# Altium footprint library custom-case.PcbLib: 342 footprints (part 5 of 22)
Each footprint in its own frame and in the unit in brackets; x right, y up, seen from the top. Pads: shape width x height; smd on the part's side, far side on the other; paste and mask are expansions set on the pad; w line width, h text height; cw(c..) or ccw(c..) is an arc to the next point about the centre after c.
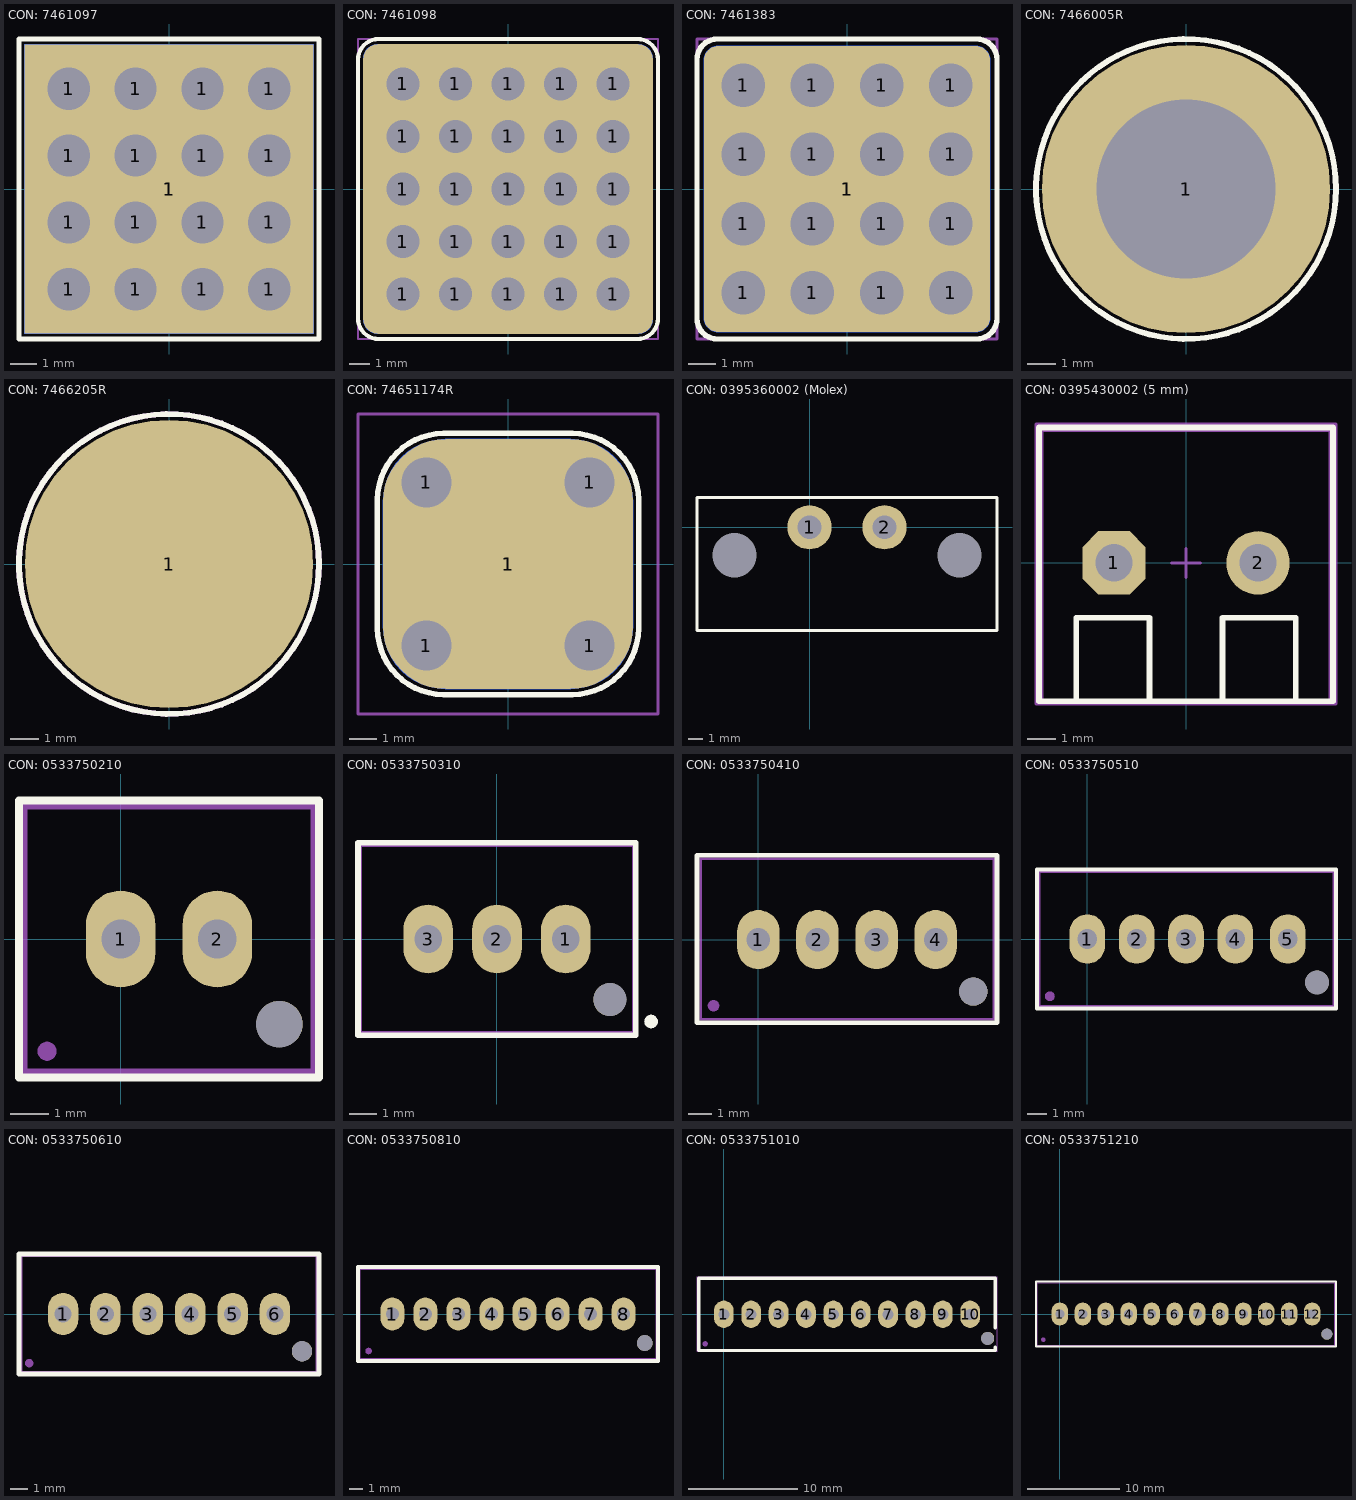
[diagram p4: the footprints below, top view; thin cyan lines are the x and y axes]

## CON: 7461097 [mm]
pads (18):
  round 2.5 hole 1.6: 1(-3.81,-3.81) 1(-3.81,-1.27) 1(-3.81,1.27) 1(-3.81,3.81) 1(-1.27,-3.81) 1(-1.27,-1.27) 1(-1.27,1.27) 1(-1.27,3.81) 1(1.27,-3.81) 1(1.27,-1.27) 1(1.27,1.27) 1(1.27,3.81) 1(3.81,-3.81) 1(3.81,-1.27) 1(3.81,1.27) 1(3.81,3.81)
  rect 11x11 smd: 1(0,0)
  rect 11x11 smd far side: 1(0,0)
Top Overlay:
  lines w0.2: -5.7,-5.7 -5.7,5.7 5.7,5.7 5.7,-5.7 -5.7,-5.7
Top Assy:
  lines w0.1: -5.7,-5.7 -5.7,5.7 5.7,5.7 5.7,-5.7 -5.7,-5.7
Size Area:
  lines w0.1: -1,0 1,0 ; 0,-1 0,1 ; -5.7,-5.7 -5.7,5.7 5.7,5.7 5.7,-5.7 -5.7,-5.7
3D body "5555.STEP": height 10.55, standoff -3.45, extent -5,-5 5,5

## CON: 7461098 [mm]
pads (27):
  round 2.5 hole 1.6: 1(-5.08,-5.08) 1(-5.08,-2.54) 1(-5.08,0) 1(-5.08,2.54) 1(-5.08,5.08) 1(-2.54,-5.08) 1(-2.54,-2.54) 1(-2.54,0) 1(-2.54,2.54) 1(-2.54,5.08) 1(0,-5.08) 1(0,-2.54) 1(0,0) 1(0,2.54) 1(0,5.08) 1(2.54,-5.08) 1(2.54,-2.54) 1(2.54,0) 1(2.54,2.54) 1(2.54,5.08) 1(5.08,-5.08) 1(5.08,-2.54) 1(5.08,0) 1(5.08,2.54) 1(5.08,5.08)
  rrect10% 14x14 smd: 1(0,0)
  rrect10% 14x14 smd far side: 1(0,0)
Top Overlay:
  lines w0.2: -7.25,-6.25 ccw(c-6.25,-6.25) -6.25,-7.25 6.25,-7.25 ccw(c6.25,-6.25) 7.25,-6.25 7.25,6.25 ccw(c6.25,6.25) 6.25,7.25 -6.25,7.25 ccw(c-6.25,6.25) -7.25,6.25 -7.25,-6.25
Top Assy:
  lines w0.1: -6.5,6.5 6.5,6.5 6.5,-6.5 ; -6.5,6.5 -6.5,-6.5 6.5,-6.5 ; -6.5,6.5 -6.5,6.5 ; 6.5,-6.5 6.5,-6.5
Size Area:
  lines w0.1: -0.5,0 0.5,0 ; 0,-0.5 0,0.5 ; -7.25,-7.25 7.25,-7.25 7.25,7.25 -7.25,7.25 -7.25,-7.25
3D body "74610981.STEP": height 15.5, standoff -3.5, extent -6.5,-6.5 6.5,6.5

## CON: 7461383 [mm]
pads (18):
  round 2.5 hole 1.6: 1(-3.81,-3.81) 1(-3.81,-1.27) 1(-3.81,1.27) 1(-3.81,3.81) 1(-1.27,-3.81) 1(-1.27,-1.27) 1(-1.27,1.27) 1(-1.27,3.81) 1(1.27,-3.81) 1(1.27,-1.27) 1(1.27,1.27) 1(1.27,3.81) 1(3.81,-3.81) 1(3.81,-1.27) 1(3.81,1.27) 1(3.81,3.81)
  rrect10% 10.5x10.5 smd: 1(0,0)
  rrect10% 10.5x10.5 smd far side: 1(0,0)
Top Overlay:
  lines w0.2: -5.5,-4.75 ccw(c-4.75,-4.75) -4.75,-5.5 4.75,-5.5 ccw(c4.75,-4.75) 5.5,-4.75 5.5,4.75 ccw(c4.75,4.75) 4.75,5.5 -4.75,5.5 ccw(c-4.75,4.75) -5.5,4.75 -5.5,-4.75
Top Assy:
  lines w0.1: -4.5,-4.5 -4.5,4.5 ; -4.5,-4.5 -4.5,-4.5 ; -4.5,-4.5 4.5,-4.5 4.5,4.5 -4.5,4.5 ; -4.5,4.5 -4.5,4.5
Size Area:
  lines w0.1: -0.5,0 0.5,0 ; 0,-0.5 0,0.5 ; -5.5,-5.5 5.5,-5.5 5.5,5.5 -5.5,5.5 -5.5,-5.5
3D body "7461383.STEP": height 12.5, standoff -3.5, extent -4.5,-4.5 4.5,4.5

## CON: 7466005R [mm]
pads (1):
  round 10 hole 6.2: 1(0,0)
Top Overlay:
  circle w0.2: c0,0 r5.2
Top Assy:
  circle w0.1: c0,0 r5.2
Size Area:
  circle w0.1: c0,0 r5.2
  lines w0.1: -1,0 1,0 ; 0,-1 0,1
3D body "Downloads_STP_7466005 (rev1).stp": height 5.1, standoff -0.9, extent -4.491,-4.5 4.491,4.464

## CON: 7466205R [mm]
pads (1):
  round 10 smd: 1(0,0)
Top Overlay:
  circle w0.2: c0,0 r5.2
Top Assy:
  circle w0.2: c0,0 r5.2
Size Area:
  circle w0.2: c0,0 r5.2
  lines w0.1: -1,0 1,0 ; 0,-1 0,1
3D body "Downloads_STP_7466205 (rev1).stp": height 7.02, standoff 0.02, extent -4.5,-4.5 4.5,4.5

## CON: 74651174R [mm]
pads (6):
  round 2.5 hole 1.8: 1(-2.94,-2.94) 1(-2.94,2.94) 1(2.94,-2.94) 1(2.94,2.94)
  rrect50% 9x9 smd: 1(0,0)
  rrect50% 9x9 smd far side: 1(0,0)
Top Overlay:
  lines w0.2: -4.7,-2.31 ccw(c-2.31,-2.31) -2.31,-4.7 2.31,-4.7 ccw(c2.31,-2.31) 4.7,-2.31 4.7,2.31 ccw(c2.31,2.31) 2.31,4.7 -2.31,4.7 ccw(c-2.31,2.31) -4.7,2.31 -4.7,-2.31
Top Assy:
  circle w0.1: c0,0 r1.5
  lines w0.1: 0,2 ccw(c0,0) 2,0 ; -3.5,-3.5 -3.5,3.5 3.5,3.5 3.5,-3.5 -3.5,-3.5
Size Area:
  lines w0.1: -5.4,-5.4 -5.4,5.4 5.4,5.4 5.4,-5.4 -5.4,-5.4
3D body "74651174 (rev1).stp": height 8.5, standoff -2.5, extent -3.5,-3.5 3.5,3.5

## CON: 0395360002 (Molex) [mm]
pads (4):
  round 3 hole 1.6: 1(0,0) 2(5.08,0)
  round 0 hole 3: MH(-5.08,-1.9) MH(10.16,-1.9)
Top Overlay:
  lines w0.2: -7.625,-7 -7.625,2.025 12.7,2.025 12.7,-7 -7.625,-7
Top Assy:
  lines w0.1: -7.625,-7 12.7,-7 12.7,2.025 -7.625,2.025 -7.625,-7
Size Area:
  lines w0.1: -7.625,-7 -7.625,2.025 12.7,2.025 12.7,-7 -7.625,-7
3D body "395360002-1.STEP": height 8.47, standoff -3.72, extent -7.625,-10.07 12.695,2.02

## CON: 0395430002 (5 mm) [mm] "2 pin 5.08mm screw connector"
height 12.5
pads (2):
  oct 2.2x2.2 hole 1.3: 1(-2.5,0)
  round 2.2 hole 1.3: 2(2.5,0)
Top Overlay:
  lines w0.2: -3.81,-4.8 -3.81,-1.905 -1.27,-1.905 -1.27,-4.8 ; 1.27,-4.8 1.27,-1.905 3.81,-1.905 3.81,-4.8 ; -5.1,-4.8 -5.1,4.7 5.1,4.7 5.1,-4.8 -5.1,-4.8
Top Assy:
  lines w0.1: -3.8,-4.799 -3.8,-1.9 -1.3,-1.9 -1.3,-4.799 ; 1.3,-4.8 1.3,-1.9 3.8,-1.9 3.8,-4.799 ; -5.004,-4.799 5.004,-4.799 5.004,4.599 -5.004,4.599 -5.004,-4.799
Size Area:
  lines w0.1: -0.5,0 0.5,0 ; 0,-0.5 0,0.5 ; -5.207,-4.9 -5.207,4.826 5.207,4.826 5.207,-4.9 -5.207,-4.9
3D body "395430002.SLDPRT": height 14.63, standoff -3.43, extent -5.004,-4.799 5.004,4.599

## CON: 0533750210 [mm] "MOLEX Mini-Lock"
height 11.5
pads (4):
  oval 1.8x2.5 hole 1: 1(0,0) 2(2.5,0)
  round 0.5 on Mech1: ""(-1.9,-2.9)
  round 1.2 hole 1.2: ""(4.1,-2.2)
Top Overlay:
  lines w0.2: -2.625,-3.575 5.125,-3.575 5.125,3.575 -2.625,3.575 -2.625,-3.575
Top Assy:
  lines w0.1: -2.45,-3.4 4.95,-3.4 4.95,3.4 -2.45,3.4 -2.45,-3.4
Size Area:
  lines w0.1: -2.5,-3.5 -2.5,3.5 5,3.5 5,-3.5 -2.5,-3.5
3D body "533750210.stp": height 11.75, standoff -3.18, extent -2.45,-3.4 4.95,3.4

## CON: 0533750310 [mm]
pads (6):
  oval 1.8x2.5 hole 1: 1(2.5,0) 2(0,0) 3(-2.5,0)
  round 1.2 hole 1.2: ""(4.1,-2.2)
  round 0.5 on Mech1: ""(4.1,-2.2)
  round 0.5 on Top Overlay: ""(5.6,-3)
Top Overlay:
  lines w0.2: -5.05,-3.5 -5.05,3.5 5.05,3.5 5.05,-3.5 -5.05,-3.5
Top Assy:
  lines w0.1: -4.95,-3.4 4.95,-3.4 4.95,3.4 -4.95,3.4 -4.95,-3.4
Size Area:
  lines w0.1: -0.5,0 0.5,0 ; 0,-0.5 0,0.5 ; -5,-3.5 -5,3.5 5,3.5 5,-3.5 -5,-3.5
3D body "533750310.stp": height 11.55, standoff -3.38, extent -4.95,-3.4 4.95,3.4

## CON: 0533750410 [mm] "MOLEX Mini-Lock"
height 11.5
pads (6):
  oval 1.8x2.5 hole 1: 1(0,0) 2(2.5,0) 3(5,0) 4(7.5,0)
  round 0.5 on Mech1: ""(-1.9,-2.8)
  round 1.2 hole 1.2: ""(9.1,-2.2)
Top Overlay:
  lines w0.2: -2.6,-3.525 -2.6,3.575 10.1,3.575 10.1,-3.525 -2.6,-3.525
Top Assy:
  lines w0.1: -2.441,-3.374 -2.441,3.426 9.959,3.426 9.959,-3.374 -2.441,-3.374
3D body "533750410.stp": height 11.55, standoff -3.38, extent -2.441,-3.374 9.959,3.426

## CON: 0533750510 [mm] "MOLEX Mini-Lock"
height 11.5
pads (7):
  oval 1.8x2.5 hole 1: 1(0,0) 2(2.5,0) 3(5,0) 4(7.5,0) 5(10.16,0)
  round 0.5 on Mech1: ""(-1.9,-2.9)
  round 1.2 hole 1.2: ""(11.64,-2.2)
Top Overlay:
  lines w0.2: -2.55,-3.525 -2.55,3.525 12.6,3.525 12.6,-3.525 -2.55,-3.525
Top Assy:
  lines w0.1: -2.425,-3.4 12.475,-3.4 12.475,3.4 -2.425,3.4 -2.425,-3.4
Size Area:
  lines w0.1: -2.6,-3.5 -2.6,3.5 12.6,3.5 12.6,-3.5 -2.6,-3.5
3D body "533750510.stp": height 11.55, standoff -3.38, extent -2.425,-3.4 12.475,3.4

## CON: 0533750610 [mm] "MOLEX Mini-Lock"
height 11.5
pads (8):
  oval 1.8x2.5 hole 1: 1(10,0) 2(12.5,0) 3(15,0) 4(17.5,0) 5(20,0) 6(22.5,0)
  round 0.5 on Mech1: ""(8,-2.9)
  round 1.2 hole 1.2: ""(24.1,-2.2)
Top Overlay:
  lines w0.3: 7.4,-3.55 7.4,3.55 25.1,3.55 25.1,-3.55 7.4,-3.55
Top Assy:
  lines w0.1: 7.55,-3.4 24.95,-3.4 24.95,3.4 7.55,3.4 7.55,-3.4
3D body "533750610.stp": height 11.55, standoff -3.38, extent 7.55,-3.4 24.95,3.4

## CON: 0533750810 [mm] "MOLEX Mini-Lock"
height 11.5
pads (10):
  oval 1.8x2.5 hole 1: 1(5,0) 2(7.5,0) 3(10,0) 4(12.5,0) 5(15,0) 6(17.5,0) 7(20,0) 8(22.5,0)
  round 0.5 on Mech1: ""(3.2,-2.8)
  round 1.2 hole 1.2: ""(24.1,-2.2)
Top Overlay:
  lines w0.3: 2.4,-3.55 25.1,-3.55 25.1,3.55 2.4,3.55 2.4,-3.55
Top Assy:
  lines w0.1: 2.55,-3.4 24.95,-3.4 24.95,3.4 2.55,3.4 2.55,-3.4
3D body "533750810.stp": height 11.55, standoff -3.38, extent 2.55,-3.4 24.95,3.4

## CON: 0533751010 [mm] "MOLEX Mini-Lock"
height 11.5
pads (12):
  oval 1.8x2.5 hole 1: 1(0,0) 2(2.5,0) 3(5,0) 4(7.5,0) 5(10,0) 6(12.5,0) 7(15,0) 8(17.5,0) 9(20,0) 10(22.5,0)
  round 0.5 on Mech1: ""(-1.7,-2.7)
  round 1.2 hole 1.2: ""(24.1,-2.2)
Top Overlay:
  lines w0.3: 24.8,-3 24.8,-3.3 -2.3,-3.3 -2.3,3.3 24.8,3.3 24.8,-1.25
Top Assy:
  lines w0.1: -2.448,-3.374 24.952,-3.374 24.952,3.426 -2.448,3.426 -2.448,-3.374
3D body "533751010.stp": height 11.55, standoff -3.38, extent -2.448,-3.374 24.952,3.426

## CON: 0533751210 [mm] "MOLEX Mini-Lock"
height 11.5
pads (14):
  oval 1.8x2.5 hole 1: 1(0,0) 2(2.5,0) 3(5,0) 4(7.5,0) 5(10,0) 6(12.5,0) 7(15,0) 8(17.5,0) 9(20,0) 10(22.5,0) 11(25,0) 12(27.5,0)
  round 0.5 on Mech1: ""(-1.8,-2.8)
  round 1.2 hole 1.2: ""(29.1,-2.2)
Top Overlay:
  lines w0.254: -2.6,-3.55 -2.6,3.55 30.1,3.55 30.1,-3.55 -2.6,-3.55
Top Assy:
  lines w0.1: -2.45,-3.4 -2.45,3.4 29.95,3.4 29.95,-3.4 -2.45,-3.4
3D body "533751210.stp": height 11.55, standoff -3.38, extent -2.45,-3.4 29.95,3.4